# Altium footprint library amirlib.PcbLib: 456 footprints (part 21 of 29)
Each footprint in its own frame and in the unit in brackets; x right, y up, seen from the top. Pads: shape width x height; smd on the part's side, far side on the other; paste and mask are expansions set on the pad; w line width, h text height; cw(c..) or ccw(c..) is an arc to the next point about the centre after c.
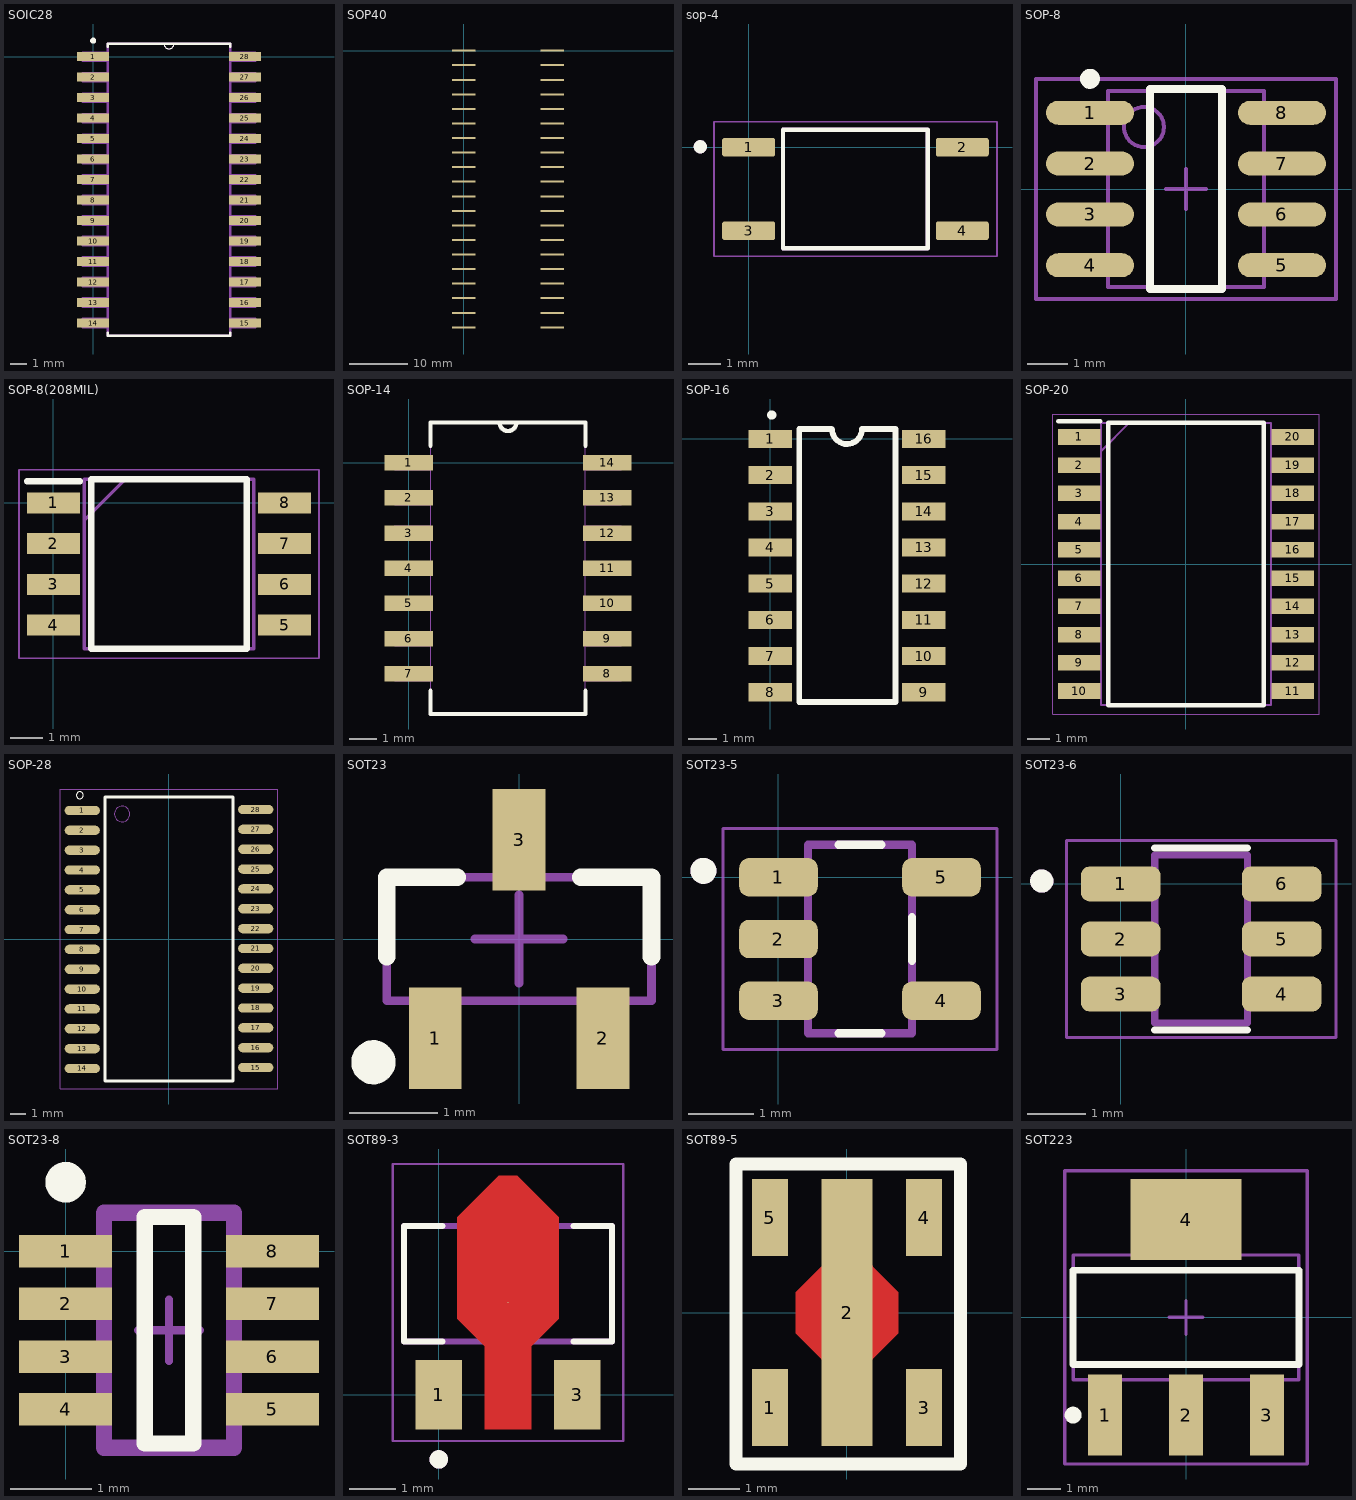
[diagram p20: the footprints below, top view; thin cyan lines are the x and y axes]

## SOIC28 [mil]
pads (28):
  rect 78x22 smd: 1(0,0) 2(0,-50) 3(0,-100) 4(0,-150) 5(0,-200) 6(0,-250) 7(0,-300) 8(0,-350) 9(0,-400) 10(0,-450) 11(0,-500) 12(0,-550) 13(0,-600) 14(0,-650) 15(370,-650) 16(370,-600) 17(370,-550) 18(370,-500) 19(370,-450) 20(370,-400) 21(370,-350) 22(370,-300) 23(370,-250) 24(370,-200) 25(370,-150) 26(370,-100) 27(370,-50) 28(370,0)
Top Overlay:
  circle w10: c0,39 r2.24
  lines w0: 173,31 ccw(c185,31) 197,31
  lines w6: 36,-674 36,-681 334,-681 334,-674 ; 36,24 36,31 173,31 197,31 334,31 334,24
Mechanical 13:
  lines w0: 173,31 ccw(c185,31) 197,31
  lines w6: -25,-660 -25,-640 36,-640 36,-660 -25,-660 ; -25,-610 -25,-590 36,-590 36,-610 -25,-610 ; -25,-560 -25,-540 36,-540 36,-560 -25,-560 ; -25,-510 -25,-490 36,-490 36,-510 -25,-510 ; -25,-460 -25,-440 36,-440 36,-460 -25,-460 ; -25,-410 -25,-390 36,-390 36,-410 -25,-410 ; -25,-360 -25,-340 36,-340 36,-360 -25,-360 ; -25,-310 -25,-290 36,-290 36,-310 -25,-310 ; -25,-260 -25,-240 36,-240 36,-260 -25,-260 ; -25,-210 -25,-190 36,-190 36,-210 -25,-210 ; -25,-160 -25,-140 36,-140 36,-160 -25,-160 ; -25,-110 -25,-90 36,-90 36,-110 -25,-110 ; -25,-60 -25,-40 36,-40 36,-60 -25,-60 ; -25,-10 -25,10 36,10 36,-10 -25,-10 ; 36,-681 334,-681 334,31 197,31 173,31 36,31 36,-681 ; 334,-660 334,-640 395,-640 395,-660 334,-660 ; 334,-610 334,-590 395,-590 395,-610 334,-610 ; 334,-560 334,-540 395,-540 395,-560 334,-560 ; 334,-510 334,-490 395,-490 395,-510 334,-510 ; 334,-460 334,-440 395,-440 395,-460 334,-460 ; 334,-410 334,-390 395,-390 395,-410 334,-410 ; 334,-360 334,-340 395,-340 395,-360 334,-360 ; 334,-310 334,-290 395,-290 395,-310 334,-310 ; 334,-260 334,-240 395,-240 395,-260 334,-260 ; 334,-210 334,-190 395,-190 395,-210 334,-210 ; 334,-160 334,-140 395,-140 395,-160 334,-160 ; 334,-110 334,-90 395,-90 395,-110 334,-110 ; 334,-60 334,-40 395,-40 395,-60 334,-60 ; 334,-10 334,10 395,10 395,-10 334,-10
3D body "ENC28J60_SO.STEP": height 104.33, standoff 0, extent -17.76,-677.36 387.76,27.36

## SOP40 [mm]
pads (40):
  rect 4x0.35 smd: 1(0,0) 2(0,-2.5) 3(0,-5) 4(0,-7.5) 5(0,-10) 6(0,-12.5) 7(0,-15) 8(0,-17.5) 9(0,-20) 10(0,-22.5) 11(0,-25) 12(0,-27.5) 13(0,-30) 14(0,-32.5) 15(0,-35) 16(0,-37.5) 17(0,-40) 18(0,-42.5) 19(0,-45) 20(0,-47.5) 21(15.2,-47.5) 22(15.2,-45) 23(15.2,-42.5) 24(15.2,-40) 25(15.2,-37.5) 26(15.2,-35) 27(15.2,-32.5) 28(15.2,-30) 29(15.2,-27.5) 30(15.2,-25) 31(15.2,-22.5) 32(15.2,-20) 33(15.2,-17.5) 34(15.2,-15) 35(15.2,-12.5) 36(15.2,-10) 37(15.2,-7.5) 38(15.2,-5) 39(15.2,-2.5) 40(15.2,0)

## sop-4 [mm]
pads (4):
  rrect25% 1.61x0.57 smd: 1(0,0) 2(6.5,0) 3(0,-2.54) 4(6.5,-2.54)
Top Overlay:
  circle w0.2: c-1.47,0.015 r0.1
  lines w0.127: 1.05,-3.07 5.45,-3.07 5.45,0.53 1.05,0.53 1.05,-3.07
Mechanical 13:
  circle w0.2: c-1.47,0.015 r0.1
  lines w0.127: 1.05,-3.07 1.05,0.53 5.45,0.53 5.45,-3.07 1.05,-3.07
Mechanical 15:
  lines w0.05: -1.055,-3.32 -1.055,0.78 7.555,0.78 7.555,-3.32 -1.055,-3.32
3D body "TLP181(GB-TPL,F,T)--3DModel-STEP-510211.STEP": height 2.8, standoff 0, extent -0.325,-3.095 6.675,0.505

## SOP-8 [mm]
pads (8):
  oval 2.2x0.6 smd: 1(-2.4,1.905) 2(-2.4,0.635) 3(-2.4,-0.635) 4(-2.4,-1.905) 5(2.4,-1.905) 6(2.4,-0.635) 7(2.4,0.635) 8(2.4,1.905)
Top Overlay:
  circle w0.25: c-2.4,2.755 r0.125
  lines w0.2: -0.9,-2.5 0.9,-2.5 0.9,2.5 -0.9,2.5 -0.9,-2.5
Mechanical 13:
  circle w0.1: c-1.05,1.55 r0.5
  lines w0.1: -1.95,-2.45 1.95,-2.45 1.95,2.45 -1.95,2.45 -1.95,-2.45
Mechanical 15:
  lines w0.1: -0.5,0 0.5,0 ; 0,-0.5 0,0.5 ; -3.75,-2.75 3.75,-2.75 3.75,2.75 -3.75,2.75 -3.75,-2.75
3D body "User Library-SOIC-8-1.step": height 1.75, standoff 0, extent -2.975,-2.425 3.025,2.475

## SOP-8(208MIL) [mm]
pads (8):
  rect 1.65x0.65 smd: 1(0,0) 2(0,-1.27) 3(0,-2.54) 4(0,-3.81) 5(7.2,-3.81) 6(7.2,-2.54) 7(7.2,-1.27) 8(7.2,0)
Top Overlay:
  lines w0.2: -0.825,0.675 0.825,0.675 ; 1.175,-4.545 1.175,0.735 6.025,0.735 6.025,-4.545 1.175,-4.545
Mechanical 13:
  lines w0.05: -1.075,-4.845 -1.075,1.035 8.275,1.035 8.275,-4.845 -1.075,-4.845
  lines w0.1: 0.96,-0.535 2.23,0.735 ; 0.96,-4.545 0.96,0.735 6.24,0.735 6.24,-4.545 0.96,-4.545
3D body "User Library-SOIC8_Wide_5mmx5mm.STEP": height 1.75, standoff -0.01, extent -0.452,-4.635 7.65,0.825

## SOP-14 [mil]
pads (14):
  rect 69x22 smd: 1(0,0) 2(0,-50) 3(0,-100) 4(0,-150) 5(0,-200) 6(0,-250) 7(0,-300) 8(282,-300) 9(282,-250) 10(282,-200) 11(282,-150) 12(282,-100) 13(282,-50) 14(282,0)
Top Overlay:
  lines w6: 31,-324 31,-357 251,-357 251,-324 ; 31,24 31,57 129,57 ; 251,24 251,57 153,57 ; 129,57 ccw(c141,57) 153,57 ; 129,57 153,57
Mechanical 13:
  lines w0: 129,57 ccw(c141,57) 153,57 ; 129,57 153,57 ; 129,57 31,57 31,-357 251,-357 251,57 153,57 ; -20,-310 -20,-290 31,-290 31,-310 -20,-310 ; -20,-260 -20,-240 31,-240 31,-260 -20,-260 ; -20,-210 -20,-190 31,-190 31,-210 -20,-210 ; -20,-160 -20,-140 31,-140 31,-160 -20,-160 ; -20,-110 -20,-90 31,-90 31,-110 -20,-110 ; -20,-60 -20,-40 31,-40 31,-60 -20,-60 ; -20,-10 -20,10 31,10 31,-10 -20,-10 ; 251,-310 251,-290 302,-290 302,-310 251,-310 ; 251,-260 251,-240 302,-240 302,-260 251,-260 ; 251,-210 251,-190 302,-190 302,-210 251,-210 ; 251,-160 251,-140 302,-140 302,-160 251,-160 ; 251,-110 251,-90 302,-90 302,-110 251,-110 ; 251,-60 251,-40 302,-40 302,-60 251,-60 ; 251,-10 251,10 302,10 302,-10 251,-10
3D body "step_temp.STEP": height 78.74, standoff 0, extent -12.54,-350.79 294.54,50.79

## SOP-16 [mil]
pads (16):
  rect 60x25 smd: 1(0,0) 2(0,-50) 3(0,-100) 4(0,-150) 5(0,-200) 6(0,-250) 7(0,-300) 8(0,-350) 9(212.2,-350) 10(212.2,-300) 11(212.2,-250) 12(212.2,-200) 13(212.2,-150) 14(212.2,-100) 15(212.2,-50) 16(212.2,0)
Top Overlay:
  circle w10: c2,33 r1.41
  lines w7.99: 40,13.58 84.82,13.58 ; 85.42,12.98 ccw(c106.1,13.58) 126.79,13.58 173,13.58
  lines w8: 40,13.58 40,-363.58 173,-363.58 173,13.58
3D body "User Library-SOP16.STEP": height 62.4, standoff 0.05, extent -10.73,-371.49 234.73,21.47

## SOP-20 [mm]
pads (20):
  rect 1.9x0.7 smd: 1(-4.8,5.715) 2(-4.8,4.445) 3(-4.8,3.175) 4(-4.8,1.905) 5(-4.8,0.635) 6(-4.8,-0.635) 7(-4.8,-1.905) 8(-4.8,-3.175) 9(-4.8,-4.445) 10(-4.8,-5.715) 11(4.8,-5.715) 12(4.8,-4.445) 13(4.8,-3.175) 14(4.8,-1.905) 15(4.8,-0.635) 16(4.8,0.635) 17(4.8,1.905) 18(4.8,3.175) 19(4.8,4.445) 20(4.8,5.715)
Top Overlay:
  lines w0.2: -5.75,6.415 -3.85,6.415 ; -3.5,-6.35 3.5,-6.35 3.5,6.35 -3.5,6.35 -3.5,-6.35
Mechanical 13:
  lines w0.1: -3.825,5.08 -2.555,6.35 ; -3.825,-6.35 3.825,-6.35 3.825,6.35 -3.825,6.35 -3.825,-6.35
Mechanical 15:
  lines w0.05: -6,-6.75 6,-6.75 6,6.75 -6,6.75 -6,-6.75
3D body "TM1637__SOP_.stp": height 2.8, standoff 0, extent -5.225,-6.35 5.225,6.35

## SOP-28 [mm]
pads (28):
  oval 2.25x0.6 smd: 1(-5.55,8.225) 2(-5.55,6.955) 3(-5.55,5.685) 4(-5.55,4.415) 5(-5.55,3.145) 6(-5.55,1.875) 7(-5.55,0.605) 8(-5.55,-0.665) 9(-5.55,-1.935) 10(-5.55,-3.205) 11(-5.55,-4.475) 12(-5.55,-5.745) 13(-5.55,-7.015) 14(-5.55,-8.285) 15(5.55,-8.225) 16(5.55,-6.955) 17(5.55,-5.685) 18(5.55,-4.415) 19(5.55,-3.145) 20(5.55,-1.875) 21(5.55,-0.605) 22(5.55,0.665) 23(5.55,1.935) 24(5.55,3.205) 25(5.55,4.475) 26(5.55,5.745) 27(5.55,7.015) 28(5.55,8.285)
Top Overlay:
  circle w0: c-5.7,9.2 r0.224
  lines w0.2: -4.1,-9.1 -4.1,9.1 4.1,9.1 4.1,-9.1 -4.1,-9.1
Mechanical 13:
  circle w0: c-3,8 r0.5
Mechanical 15:
  lines w0.05: -6.95,-9.6 -6.95,9.6 6.95,9.6 6.95,-9.6 -6.95,-9.6
3D body "User Library-SOP28.STEP": height 1.66, standoff 0.04, extent -5.43,-9.042 5.747,9.068

## SOT23 [mm]
pads (3):
  rect 0.6x1.15 smd: 1(-0.95,-1.125) 2(0.95,-1.125) 3(0,1.125)
Top Overlay:
  circle w0.25: c-1.651,-1.397 r0.125
  lines w0.2: -1.5,-0.2 -1.5,0.7 -0.7,0.7 ; 0.7,0.7 1.5,0.7 1.5,-0.2
Mechanical 13:
  lines w0.1: -1.5,-0.7 1.5,-0.7 1.5,0.7 -1.5,0.7 -1.5,-0.7
Mechanical 15:
  lines w0.1: -0.5,0 0.5,0 ; 0,-0.5 0,0.5
3D body "TLVH431BIDBZRG4.STEP": height 1.12, standoff 0, extent -1.502,-1.325 1.418,1.044

## SOT23-5 [mm]
pads (5):
  rrect50% 1.21x0.59 smd: 1(0,0) 2(0,-0.95) 3(0,-1.9) 4(2.51,-1.9) 5(2.51,0)
Top Overlay:
  circle w0.2: c-1.155,0.1 r0.1
  lines w0.127: 0.925,-2.4 1.585,-2.4 ; 0.925,0.5 1.585,0.5 ; 2.055,-1.285 2.055,-0.615
Mechanical 13:
  circle w0.2: c-1.155,0.1 r0.1
  lines w0.127: 0.455,-2.4 2.055,-2.4 2.055,0.5 0.455,0.5 0.455,-2.4
Mechanical 15:
  lines w0.05: -0.855,-2.65 -0.855,0.75 3.365,0.75 3.365,-2.65 -0.855,-2.65
3D body "LP2985-33DBVR.STEP": height 1.45, standoff 0, extent -0.079,-2.364 2.721,0.536

## SOT23-6 [mm]
pads (6):
  rrect50% 1.375x0.6 smd: 1(0,0) 2(0,-0.95) 3(0,-1.9) 4(2.777,-1.9) 5(2.777,-0.95) 6(2.777,0)
Top Overlay:
  circle w0.2: c-1.361,0.05 r0.1
  lines w0.127: 0.589,-2.52 2.189,-2.52 ; 0.589,0.62 2.189,0.62
Mechanical 13:
  circle w0.2: c-1.361,0.05 r0.1
  lines w0.127: 0.589,-2.4 0.589,0.5 2.189,0.5 2.189,-2.4 0.589,-2.4
Mechanical 15:
  lines w0.05: -0.937,-2.65 3.715,-2.65 3.715,0.75 -0.937,0.75 -0.937,-2.65
3D body "step_temp.STEP": height 1.3, standoff 0, extent -0.011,-2.4 2.789,0.5

## SOT23-8 [mm]
pads (8):
  rect 1.15x0.4 smd: 1(0,0) 2(0,-0.65) 3(0,-1.3) 4(0,-1.95) 5(2.55,-1.95) 6(2.55,-1.3) 7(2.55,-0.65) 8(2.55,0)
Top Overlay:
  circle w0.25: c0,0.85 r0.125
  lines w0.2: 0.975,-2.372 0.975,0.422 1.575,0.422 1.575,-2.372 0.975,-2.372
Mechanical 13:
  lines w0.2: 0.475,-2.425 2.075,-2.425 2.075,0.475 0.475,0.475 0.475,-2.425
Mechanical 15:
  lines w0.1: 0.894,-0.975 1.656,-0.975 ; 1.275,-1.356 1.275,-0.594
3D body "User Library-SOT-23-8 Thin.STEP": height 1.1, standoff 0, extent -0.21,-2.415 2.748,0.485

## SOT89-3 [mm]
pads (3):
  rect 1x1.5 smd mask+0.07: 1(0,0) 3(3,0)
  round 0.025 smd: 2(1.5,2)
Top Layer:
  region: 1.3,4.75 1.7,4.75 2.6,3.85 2.6,1.65 2,1.05 2,-0.75 1,-0.75 1,1.05 0.4,1.65 0.4,3.85
Top Overlay:
  circle w0.2: c0,-1.4 r0.1
  lines w0.127: 0.08,1.155 -0.75,1.155 -0.75,3.655 0.08,3.655 ; 2.92,1.155 3.75,1.155 3.75,3.655 2.92,3.655
Mechanical 13:
  circle w0.2: c0,-1.4 r0.1
  lines w0.127: -0.75,1.155 -0.75,3.655 3.75,3.655 3.75,1.155 -0.75,1.155
Mechanical 15:
  lines w0.05: -1,-1 -1,5 4,5 4,-1 -1,-1
3D body "step_temp.STEP": height 1.6, standoff 0, extent -0.75,0.08 3.75,4.175

## SOT89-5 [mm]
pads (5):
  rect 0.7x1.5 smd: 1(-1.5,-1.85) 3(1.5,-1.85) 4(1.5,1.85) 5(-1.5,1.85)
  rect 1x5.2 smd: 2(0,0)
Top Layer:
  region: 1,0.4 1,-0.4 0,-1.4 -1,-0.4 -1,0.4 0,1.4
Top Overlay:
  lines w0.254: -2.159,2.896 -2.159,-2.946 2.21,-2.946 2.21,2.896 -2.134,2.896
Top Solder:
  region: 1,0.4 1,-0.4 0,-1.4 -1,-0.4 -1,0.4 0,1.4
3D body "User Library-SOT89-5.STEP": height 1.54, standoff 0, extent -2.25,-2.25 2.25,2.25

## SOT223 [mm]
pads (4):
  rect 1x2.4 smd: 1(-2.4,-2.9) 2(0,-2.9) 3(2.4,-2.9)
  rect 3.3x2.4 smd: 4(0,2.9)
Top Overlay:
  circle w0.25: c-3.35,-2.9 r0.125
  lines w0.2: -3.35,-1.4 -3.35,1.4 3.35,1.4 3.35,-1.4 -3.35,-1.4
Mechanical 13:
  lines w0.1: -3.35,-1.85 -3.35,1.85 3.35,1.85 3.35,-1.85 -3.35,-1.85
Mechanical 15:
  lines w0.1: -0.5,0 0.5,0 ; 0,-0.5 0,0.5 ; -3.6,-4.35 -3.6,4.35 3.6,4.35 3.6,-4.35 -3.6,-4.35
3D body "AMS1117.STEP": height 1.87, standoff 0.06, extent -3.277,-3.219 3.226,3.778